# Altium footprint library PHOENIX_1771004.PcbLib: 1 footprints
Each footprint in its own frame and in the unit in brackets; x right, y up, seen from the top. Pads: shape width x height; smd on the part's side, far side on the other; paste and mask are expansions set on the pad; w line width, h text height; cw(c..) or ccw(c..) is an arc to the next point about the centre after c.
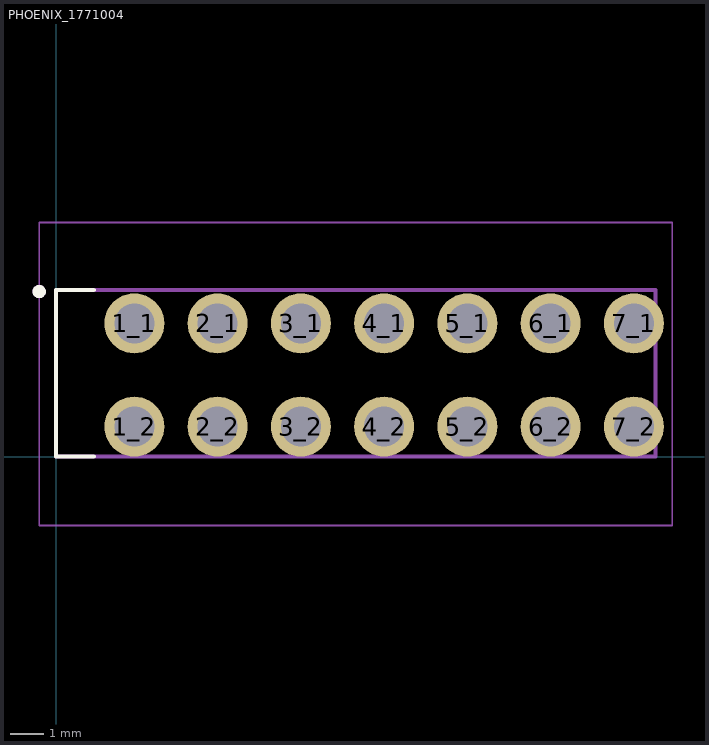
[diagram p0: the footprint, top view; thin cyan lines are the x and y axes]

## PHOENIX_1771004 [mm]
pads (14):
  round 1.8 hole 1.2 mask+0.102: 1_1(2.35,4) 1_2(2.35,0.9) 2_1(4.85,4) 2_2(4.85,0.9) 3_1(7.35,4) 3_2(7.35,0.9) 4_1(9.85,4) 4_2(9.85,0.9) 5_1(12.35,4) 5_2(12.35,0.9) 6_1(14.85,4) 6_2(14.85,0.9) 7_1(17.35,4) 7_2(17.35,0.9)
Top Overlay:
  circle w0.2: c-0.508,4.953 r0.1
  lines w0.127: 1.13,0 0,0 0,5 1.13,5
Assembly Top:
  circle w0.2: c-0.508,4.953 r0.1
  lines w0.127: 0,0 0,5 18,5 18,0 0,0
Courtyard Top:
  lines w0.05: -0.5,-2.072 18.5,-2.072 18.5,7.028 -0.5,7.028 -0.5,-2.072
3D body "pxc_1771004_00_01_PTSM-0-5-7-2-5-V-THR-R44_3D.stp": height 10, standoff -2.1, extent 0.007,0 18.027,5